# Altium footprint library boost_converter_Pcblib.PcbLib: 21 footprints (part 2 of 2)
Each footprint in its own frame and in the unit in brackets; x right, y up, seen from the top. Pads: shape width x height; smd on the part's side, far side on the other; paste and mask are expansions set on the pad; w line width, h text height; cw(c..) or ccw(c..) is an arc to the next point about the centre after c.
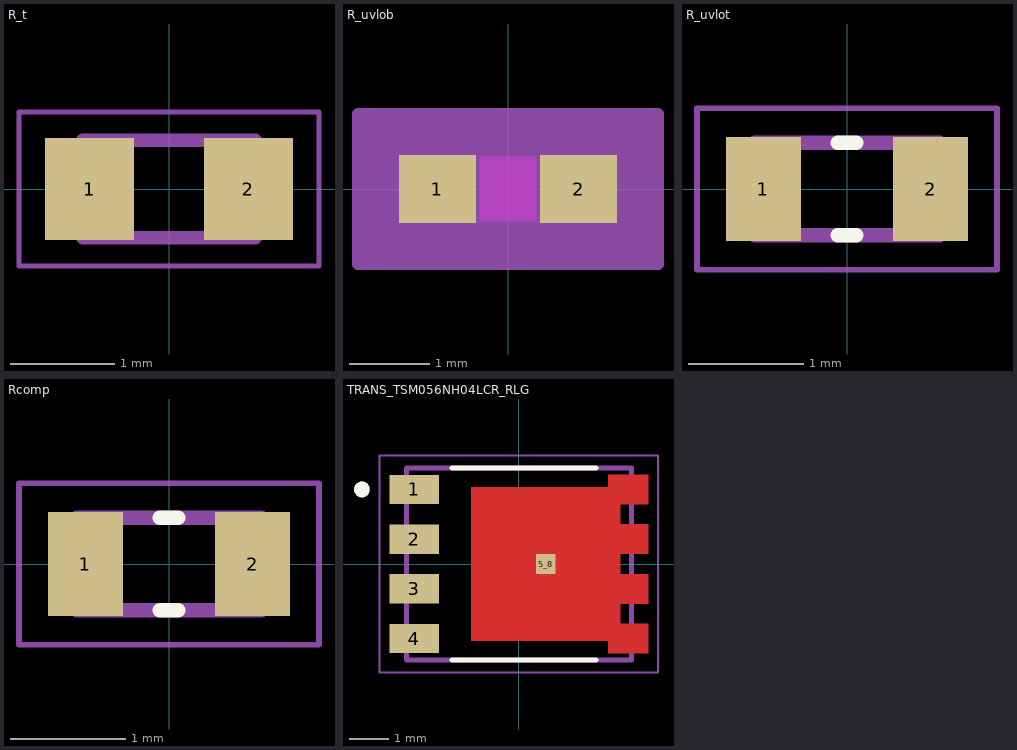
[diagram p1: the footprints below, top view; thin cyan lines are the x and y axes]

## R_t [mm]
pads (2):
  rect 0.86x0.98 smd: 1(-0.765,0) 2(0.765,0)
Mechanical 13:
  lines w0.127: -0.83,-0.47 0.83,-0.47 0.83,0.47 -0.83,0.47 -0.83,-0.47
Mechanical 15:
  lines w0.05: -1.444,-0.74 1.444,-0.74 1.444,0.74 -1.444,0.74 -1.444,-0.74
3D body "step_temp.STEP": height 0.55, standoff 0, extent -0.775,-0.425 0.775,0.425

## R_uvlob [mm]
pads (2):
  rect 0.959x0.851 smd paste+0 mask+0: 1(-0.879,0) 2(0.879,0)
Top Layer keep-out:
  region: -0.349,-0.349 -0.349,0.349 0.349,0.349 0.349,-0.349
Top Overlay:
  text ".Designator" at -3.492,-0.635 h1.27
Keep-Out Layer:
  region: -0.349,-0.4 -0.349,0.4 0.349,0.4 0.349,-0.4
Mechanical 13:
  lines w0.025: -0.8,-0.4 -0.8,0.4 ; -0.8,-0.4 0.8,-0.4 ; -0.8,-0.4 -0.4,-0.4 -0.4,0.4 -0.8,0.4 ; -0.8,-0.4 -0.8,0.4 ; -0.8,0.4 0.8,0.4 ; 0.8,-0.4 0.8,0.4 ; 0.8,-0.4 0.8,0.4 ; 0.8,-0.4 0.4,-0.4 0.4,0.4 0.8,0.4
  text ".Designator" at -3.492,-0.635 h1.27
Mechanical 15:
  region: 1.867,-0.933 -1.867,-0.933 -1.867,0.933 1.867,0.933
  lines w0.152: -1.867,-0.933 1.867,-0.933 1.867,0.933 -1.867,0.933 -1.867,-0.933
3D body "RC0603N_PAN.step": height 0.71, standoff 0, extent -0.8,-0.4 0.8,0.4

## R_uvlot [mm]
height 0.45
pads (2):
  rect 0.65x0.9 smd paste+0 mask+0.102: 1(-0.725,0) 2(0.725,0)
Top Overlay:
  lines w0.127: -0.08,-0.4 0.08,-0.4 ; -0.08,0.4 0.08,0.4
Mechanical 13:
  lines w0.127: -0.8,-0.4 -0.8,0.4 0.8,0.4 0.8,-0.4 -0.8,-0.4
Mechanical 15:
  lines w0.05: -1.3,-0.7 -1.3,0.7 1.3,0.7 1.3,-0.7 -1.3,-0.7
3D body "step_temp.STEP": height 0.45, standoff 0, extent -0.8,-0.4 0.8,0.4

## Rcomp [mm]
height 0.45
pads (2):
  rect 0.65x0.9 smd paste+0 mask+0.102: 1(-0.725,0) 2(0.725,0)
Top Overlay:
  lines w0.127: -0.08,-0.4 0.08,-0.4 ; -0.08,0.4 0.08,0.4
Mechanical 13:
  lines w0.127: -0.8,-0.4 -0.8,0.4 0.8,0.4 0.8,-0.4 -0.8,-0.4
Mechanical 15:
  lines w0.05: -1.3,-0.7 -1.3,0.7 1.3,0.7 1.3,-0.7 -1.3,-0.7
3D body "step_temp.STEP": height 0.45, standoff 0, extent -0.8,-0.4 0.8,0.4

## TRANS_TSM056NH04LCR_RLG [mm]
height 1.1
pads (5):
  rect 1.27x0.75 smd: 1(-2.67,1.905) 2(-2.67,0.635) 3(-2.67,-0.635) 4(-2.67,-1.905)
  rect 0.5x0.5 smd paste-1 mask+0: 5_8(0.69,0)
Top Layer:
  region: 3.305,1.53 2.595,1.53 2.595,1.01 3.305,1.01 3.305,0.26 2.595,0.26 2.595,-0.26 3.305,-0.26 3.305,-1.01 2.595,-1.01 2.595,-1.53 3.305,-1.53 3.305,-2.28 2.285,-2.28 2.285,-1.955 -1.215,-1.955 -1.215,1.955 2.285,1.955 2.285,2.28 3.305,2.28
Top Overlay:
  circle w0.2: c-4.01,1.905 r0.1
  lines w0.127: -1.715,-2.45 1.965,-2.45 ; -1.715,2.45 1.965,2.45
Top Paste:
  region: 3.305,-2.28 2.595,-2.28 2.595,-1.53 3.305,-1.53
  region: 3.305,-1.01 2.595,-1.01 2.595,-0.26 3.305,-0.26
  region: 3.305,0.26 2.595,0.26 2.595,1.01 3.305,1.01
  region: 3.305,1.53 2.595,1.53 2.595,2.28 3.305,2.28
  region: 0.455,-1.485 -0.745,-1.485 -0.745,-0.235 0.455,-0.235
  region: 2.125,-1.485 0.925,-1.485 0.925,-0.235 2.125,-0.235
  region: 2.125,0.235 0.925,0.235 0.925,1.485 2.125,1.485
  region: 0.455,0.235 -0.745,0.235 -0.745,1.485 0.455,1.485
Top Solder:
  region: 3.405,1.43 2.695,1.43 2.695,1.11 3.405,1.11 3.405,0.16 2.695,0.16 2.695,-0.16 3.405,-0.16 3.405,-1.11 2.695,-1.11 2.695,-1.43 3.405,-1.43 3.405,-2.38 2.185,-2.38 2.185,-2.055 -1.315,-2.055 -1.315,2.055 2.185,2.055 2.185,2.38 3.405,2.38
Mechanical 13:
  circle w0.2: c-4.01,1.905 r0.1
  lines w0.127: -2.875,-2.45 2.875,-2.45 2.875,2.45 -2.875,2.45 -2.875,-2.45
Mechanical 15:
  lines w0.05: -3.555,-2.775 3.555,-2.775 3.555,2.775 -3.555,2.775 -3.555,-2.775
3D body "step_temp.STEP": height 1.1, standoff 0, extent -3.175,-2.525 3.175,2.525